# Altium footprint library WE-RJ45 LAN.PcbLib: 101 footprints (part 6 of 7)
Each footprint in its own frame and in the unit in brackets; x right, y up, seen from the top. Pads: shape width x height; smd on the part's side, far side on the other; paste and mask are expansions set on the pad; w line width, h text height; cw(c..) or ccw(c..) is an arc to the next point about the centre after c.
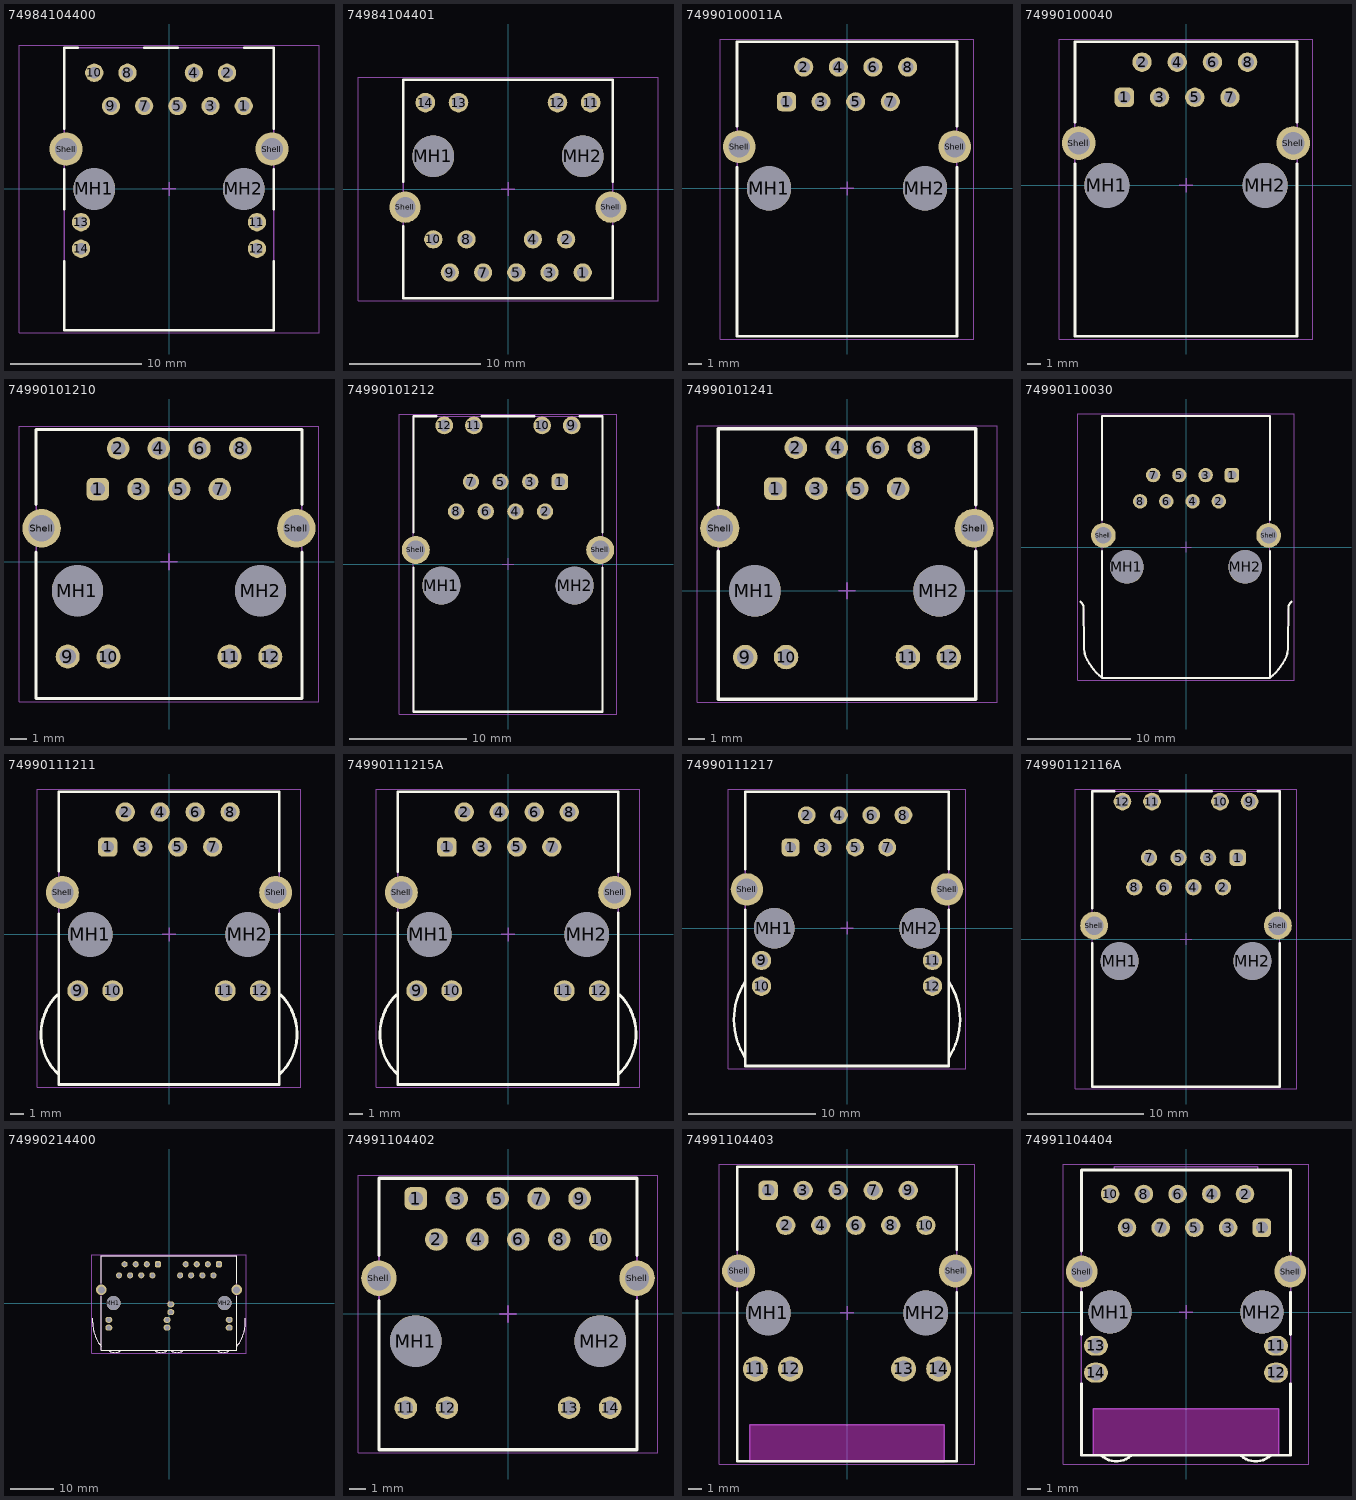
[diagram p5: the footprints below, top view; thin cyan lines are the x and y axes]

## 74984104400 [mm] "10/100Base-T, PoE+, THT, 1x1, Tab up, w/o shield tabs, LED L-R yellow-green/yellow-green, THRw-green/yellow-green, THR"
height 13.85
pads (17):
  round 1.4 hole 0.89: 1(5.72,6.35) 2(4.44,8.89) 3(3.18,6.35) 4(1.9,8.89) 5(0.64,6.35) 7(-1.9,6.35) 8(-3.18,8.89) 9(-4.44,6.35) 10(-5.72,8.89) 11(6.725,-2.54) 12(6.725,-4.57) 13(-6.725,-2.54) 14(-6.725,-4.57)
  round 3.2 hole 3.2 unplated: MH1(-5.715,0) MH2(5.715,0)
  round 2.55 hole 1.7: Shell(-7.875,3.05) Shell(7.875,3.05)
Top Overlay:
  lines w0.2: -8,-5.55 -8,-10.8 8,-10.8 8,-5.55 ; -8,-1.56 -8,1.5 ; -8,4.6 -8,10.8 -7,10.8 ; -1.9,10.8 0.65,10.8 ; 5.75,10.8 8,10.8 8,4.6 ; 8,-1.56 8,1.5
Top Paste:
  region: 11.275,1.75 4.475,1.75 4.475,4.35 11.275,4.35
  region: -4.475,1.75 -11.275,1.75 -11.275,4.35 -4.475,4.35
  region: -2.07,7.79 -4.27,7.79 -4.27,10.59 -2.07,10.59
  region: -4.61,7.79 -6.81,7.79 -6.81,10.59 -4.61,10.59
  region: 3.01,7.79 0.81,7.79 0.81,10.59 3.01,10.59
  region: 5.55,7.79 3.35,7.79 3.35,10.59 5.55,10.59
  region: 6.83,7.45 4.63,7.45 4.63,4.65 6.83,4.65
  region: 4.29,7.45 2.09,7.45 2.09,4.65 4.29,4.65
  region: 1.75,7.45 -0.45,7.45 -0.45,4.65 1.75,4.65
  region: -0.79,7.45 -2.99,7.45 -2.99,4.65 -0.79,4.65
  region: -3.33,7.45 -5.53,7.45 -5.53,4.65 -3.33,4.65
  region: 8.625,-5.37 4.825,-5.37 4.825,-3.77 8.625,-3.77
  region: 8.625,-3.34 4.825,-3.34 4.825,-1.74 8.625,-1.74
  region: -4.825,-5.37 -8.625,-5.37 -8.625,-3.77 -4.825,-3.77
  region: -4.825,-3.34 -8.625,-3.34 -8.625,-1.74 -4.825,-1.74
Assembly Notes:
  text "The stencil layout appplied for / PCB 1.6mm and Stencil 0.15mm" at -5.15,-12.7 h0.5
Top Assembly:
  lines w0.1: -8,-10.8 8,-10.8 8,10.8 -8,10.8 -8,-10.8
Top Designator:
  text ".Designator" at -3.647,-0.357 h1
Top 3D Body:
  lines w0.1: -8,-10.8 8,-10.8 8,10.8 -8,10.8 -8,-10.8
Top Courtyard:
  lines w0.05: -11.475,-11 -11.475,11 11.475,11 11.475,-11 -11.475,-11
Top Component Center:
  lines w0.1: -0.5,0 0.5,0 ; 0,-0.5 0,0.5
3D body "74984104400.stp": height 13.62, standoff -2.9, extent -8.15,-10.8 8.15,10.8

## 74984104401 [mm] "LAN Transformer Through Hole Reflow, body 16.05x16.7mm"
height 16.9
pads (17):
  round 1.4 hole 0.89 paste-2539.97: 1(5.715,-6.39) 2(4.445,-3.85) 3(3.175,-6.39) 4(1.905,-3.85) 5(0.635,-6.39) 7(-1.905,-6.39) 8(-3.175,-3.85) 9(-4.445,-6.39) 10(-5.715,-3.85)
  round 1.5 hole 1 paste-2539.97: 11(6.325,6.61) 12(3.785,6.61) 13(-3.785,6.61) 14(-6.325,6.61)
  round 3.2 hole 3.2 unplated paste-2539.97: MH1(-5.715,2.5) MH2(5.715,2.5)
  round 2.4 hole 1.57 paste-2539.97: Shell(-7.875,-1.39) Shell(7.875,-1.39)
Top Overlay:
  lines w0.2: -8.025,-2.85 -8.025,-8.35 8.025,-8.35 8.025,-2.85 ; -8.025,0.55 -8.025,8.35 8.025,8.35 8.025,0.55
Top Paste:
  region: 4.57,-5.45 8.07,-5.45 8.07,-7.05 4.57,-7.05
  region: -5.59,-5.45 -3.3,-5.45 -3.3,-8.05 -5.59,-8.05
  region: -3.05,-5.45 -0.76,-5.45 -0.76,-8.05 -3.05,-8.05
  region: -0.51,-5.45 1.78,-5.45 1.78,-8.05 -0.51,-8.05
  region: 2.03,-5.45 4.32,-5.45 4.32,-8.05 2.03,-8.05
  region: -4.57,-5.15 -6.86,-5.15 -6.86,-2.55 -4.57,-2.55
  region: -2.03,-5.15 -4.32,-5.15 -4.32,-2.55 -2.03,-2.55
  region: 3.05,-5.15 0.76,-5.15 0.76,-2.55 3.05,-2.55
  region: 5.59,-5.15 3.3,-5.15 3.3,-2.55 5.59,-2.55
  region: -4.475,0.35 -11.275,0.35 -11.275,-2.25 -4.475,-2.25
  region: 4.475,0.35 11.275,0.35 11.275,-2.25 4.475,-2.25
  region: -2.425,5.31 -4.625,5.31 -4.625,7.91 -2.425,7.91
  region: 5.145,5.31 2.945,5.31 2.945,7.91 5.145,7.91
  region: 7.685,5.31 5.485,5.31 5.485,7.91 7.685,7.91
  region: -4.965,5.31 -7.165,5.31 -7.165,7.91 -4.965,7.91
Top Assembly:
  lines w0.1: -8.025,-8.35 8.025,-8.35 8.025,8.35 -8.025,8.35 -8.025,-8.35
Top Designator:
  text ".Designator" at -3.647,-0.357 h1
Top 3D Body:
  lines w0.1: -8.025,-8.35 8.025,-8.35 8.025,8.35 -8.025,8.35 -8.025,-8.35
Top Courtyard:
  lines w0.05: -11.475,-8.55 11.475,-8.55 11.475,8.55 -11.475,8.55 -11.475,-8.55
Top Component Center:
  lines w0.1: -0.5,0 0.5,0 ; 0,-0.5 0,0.5
3D body "74984104401.stp": height 16.95, standoff -2.15, extent -8.225,-8.35 8.223,8.35

## 74990100011A [mm] "LAN Transformer, body 21.84x16.13mm"
height 13.74
pads (12):
  rrect50% 1.4x1.4 hole 0.89: 1(-4.445,6.35)
  round 1.4 hole 0.89: 2(-3.175,8.89) 3(-1.905,6.35) 4(-0.635,8.89) 5(0.635,6.35) 6(1.905,8.89) 7(3.175,6.35) 8(4.445,8.89)
  round 3.25 hole 3.25 unplated: MH1(-5.715,0) MH2(5.715,0)
  round 2.4 hole 1.6: Shell(-7.9,3.05) Shell(7.9,3.05)
Top Overlay:
  lines w0.2: -8.065,1.55 -8.065,-10.85 8.065,-10.85 8.065,1.55 ; -8.065,4.55 -8.065,10.75 8.065,10.75 8.065,4.55
Top Assembly:
  lines w0.1: -8.065,-10.85 8.065,-10.85 8.065,10.75 -8.065,10.75 -8.065,-10.85
Top Designator:
  text ".Designator" at -3.647,-0.357 h1
Top 3D Body:
  lines w0.1: -8.065,-10.85 8.065,-10.85 8.065,10.75 -8.065,10.75 -8.065,-10.85
Top Courtyard:
  lines w0.05: -9.3,-11.05 -9.3,10.95 9.3,10.95 9.3,-11.05 -9.3,-11.05
Top Component Center:
  lines w0.1: -0.5,0 0.5,0 ; 0,-0.5 0,0.5
3D body "74990100011A.stp": height 13.78, standoff -2.94, extent -8.089,-10.85 8.089,10.75

## 74990100040 [mm] "10/100Base-T, THT, 1x1, Tab down, w/o shield tabs, w/o LED, ETR"
height 13.5
pads (12):
  rrect50% 1.4x1.4 hole 0.89: 1(-4.445,6.35)
  round 1.4 hole 0.89: 2(-3.175,8.89) 3(-1.905,6.35) 4(-0.635,8.89) 5(0.635,6.35) 6(1.905,8.89) 7(3.175,6.35) 8(4.445,8.89)
  round 3.25 hole 3.25 unplated: MH1(-5.715,0) MH2(5.715,0)
  round 2.43 hole 1.63: Shell(-7.745,3.05) Shell(7.745,3.05)
Top Overlay:
  lines w0.2: -8.02,1.55 -8.02,-10.89 8.02,-10.89 8.02,1.55 ; -8.02,4.55 -8.02,10.36 8.02,10.36 8.02,4.55
Top Assembly:
  lines w0.1: -8.02,-10.89 8.02,-10.89 8.02,10.36 -8.02,10.36 -8.02,-10.89
Top Designator:
  text ".Designator" at -3.647,-0.357 h1
Top 3D Body:
  lines w0.1: -8.02,-10.89 8.02,-10.89 8.02,10.36 -8.02,10.36 -8.02,-10.89
Top Courtyard:
  lines w0.05: -9.145,-11.09 9.145,-11.09 9.145,10.56 -9.145,10.56 -9.145,-11.09
Top Component Center:
  lines w0.1: -0.5,0 0.5,0 ; 0,-0.5 0,0.5
3D body "74990100040.stp": height 13.55, standoff -3.55, extent -8.15,-10.89 8.15,10.36

## 74990101210 [mm] "LAN Transformer, THT, body 17.1x16.6mm"
height 17.5
pads (16):
  rrect50% 1.4x1.4 hole 0.89: 1(-4.445,4.53)
  round 1.4 hole 0.89: 2(-3.175,7.07) 3(-1.905,4.53) 4(-0.635,7.07) 5(0.635,4.53) 6(1.905,7.07) 7(3.175,4.53) 8(4.445,7.07)
  round 1.5 hole 1.02: 9(-6.325,-5.93) 10(-3.785,-5.93) 11(3.785,-5.93) 12(6.325,-5.93)
  round 3.2 hole 3.2 unplated: MH1(-5.715,-1.82) MH2(5.715,-1.82)
  round 2.4 hole 1.63: Shell(-7.95,2.08) Shell(7.95,2.08)
Top Overlay:
  lines w0.2: -8.3,0.6 -8.3,-8.55 8.3,-8.55 8.3,0.6 ; -8.3,3.56 -8.3,8.25 8.3,8.25 8.3,3.56
Top Assembly:
  lines w0.1: -8.3,-8.55 -8.3,8.25 8.3,8.25 8.3,-8.55 -8.3,-8.55
Top Designator:
  text ".Designator" at -3.647,-0.357 h1
Top 3D Body:
  lines w0.1: -8.3,-8.55 -8.3,8.25 8.3,8.25 8.3,-8.55 -8.3,-8.55
Top Courtyard:
  lines w0.05: -9.365,-8.75 -9.365,8.45 9.365,8.45 9.365,-8.75 -9.365,-8.75
Top Component Center:
  lines w0.1: -0.5,0 0.5,0 ; 0,-0.5 0,0.5
3D body "74990101210.stp": height 17.1, standoff -3.5, extent -8.3,-8.55 8.3,8.35

## 74990101212 [mm] "LAN Transformer, body 25.3x16.2mm"
height 13.5
pads (16):
  rrect50% 1.4x1.4 hole 0.9: 1(4.445,7.04)
  round 1.4 hole 0.9: 2(3.175,4.5) 3(1.905,7.04) 4(0.635,4.5) 5(-0.635,7.04) 6(-1.905,4.5) 7(-3.175,7.04) 8(-4.445,4.5)
  round 1.52 hole 1.02: 9(5.465,11.87) 10(2.925,11.87) 11(-2.925,11.87) 12(-5.465,11.87)
  round 3.25 hole 3.25 unplated: MH1(-5.715,-1.85) MH2(5.715,-1.85)
  round 2.4 hole 1.6: Shell(-7.9,1.2) Shell(7.9,1.2)
Top Overlay:
  lines w0.2: -8.1,-0.3 -8.1,-12.65 8.1,-12.65 8.1,-0.3 ; -8.1,2.7 -8.1,12.65 -6.15,12.65 ; -2.25,12.65 2.24,12.65 ; 6.15,12.65 8.1,12.65 8.1,2.7
Top Assembly:
  lines w0.1: -8.1,-12.65 8.1,-12.65 8.1,12.65 -8.1,12.65 -8.1,-12.65
Top Designator:
  text ".Designator" at -3.647,-0.357 h1
Top 3D Body:
  lines w0.1: -8.1,-12.65 8.1,-12.65 8.1,12.65 -8.1,12.65 -8.1,-12.65
Top Courtyard:
  lines w0.05: -9.3,-12.85 9.3,-12.85 9.3,12.85 -9.3,12.85 -9.3,-12.85
Top Component Center:
  lines w0.1: -0.5,0 0.5,0 ; 0,-0.5 0,0.5
3D body "74990101212.stp": height 13.61, standoff -3.79, extent -8.2,-12.65 8.2,12.65

## 74990101241 [mm] "LAN Transformer, body 17.5x16.8mm"
height 17.5
pads (16):
  rrect50% 1.4x1.4 hole 0.89: 1(-4.445,6.35)
  round 1.4 hole 0.89: 2(-3.175,8.89) 3(-1.905,6.35) 4(-0.635,8.89) 5(0.635,6.35) 6(1.905,8.89) 7(3.175,6.35) 8(4.445,8.89)
  round 1.52 hole 1.02: 9(-6.325,-4.11) 10(-3.785,-4.11) 11(3.785,-4.11) 12(6.325,-4.11)
  round 3.2 hole 3.2 unplated: MH1(-5.715,0) MH2(5.715,0)
  round 2.43 hole 1.63: Shell(-7.9,3.89) Shell(7.9,3.89)
Top Overlay:
  lines w0.2: -8,2.47 -8,-6.73 8,-6.73 8,2.47 ; -8,5.33 -8,10.07 8,10.07 8,5.33
Top Assembly:
  lines w0.1: -8,-6.73 8,-6.73 8,10.07 -8,10.07 -8,-6.73
Top Designator:
  text ".Designator" at -3.647,-0.357 h1
Top 3D Body:
  lines w0.1: -8,-6.73 8,-6.73 8,10.07 -8,10.07 -8,-6.73
Top Courtyard:
  lines w0.05: -9.315,-6.93 -9.315,10.27 9.315,10.27 9.315,-6.93 -9.315,-6.93
Top Component Center:
  lines w0.1: -0.5,0 0.5,0 ; 0,-0.5 0,0.5
3D body "74990101241.stp": height 16.94, standoff -3.46, extent -8.17,-6.78 8.17,10.07

## 74990110030 [mm] "LAN Transformer, body 25.35x16.25mm"
height 13.5
pads (12):
  rrect50% 1.4x1.4 hole 0.9: 1(4.445,6.965)
  round 1.4 hole 0.9: 2(3.175,4.425) 3(1.905,6.965) 4(0.635,4.425) 5(-0.635,6.965) 6(-1.905,4.425) 7(-3.175,6.965) 8(-4.445,4.425)
  round 3.25 hole 3.25 unplated: MH1(-5.715,-1.925) MH2(5.715,-1.925)
  round 2.4 hole 1.6: Shell(-8,1.125) Shell(8,1.125)
Top Overlay:
  lines w0.2: -10.21,-5.293 cw(c-10.631,-5.879) -9.917,-5.98 -9.879,-9.38 ccw(c-3,-9.28) -9.853,-9.88 ccw(c-7.8,-9.88) -9.728,-10.585 ccw(c-4.3,-8.08) -8.125,-12.675 ; -8.125,-0.375 -8.125,-12.675 ; -8.125,2.625 -8.125,12.675 8.125,12.675 8.125,2.625 ; 8.125,-0.375 8.125,-12.675 ; 10.21,-5.293 ccw(c10.631,-5.879) 9.917,-5.98 9.879,-9.38 cw(c3,-9.28) 9.853,-9.88 cw(c7.8,-9.88) 9.728,-10.585 cw(c4.3,-8.08) 8.125,-12.675 ; -8.125,-12.675 8.125,-12.675
Top Assembly:
  lines w0.1: -10.21,-5.293 cw(c-10.631,-5.879) -9.917,-5.98 -9.879,-9.38 ccw(c-3,-9.28) -9.853,-9.88 ccw(c-7.8,-9.88) -9.728,-10.585 ccw(c-4.3,-8.08) -8.125,-12.675 ; 10.21,-5.293 ccw(c10.631,-5.879) 9.917,-5.98 9.879,-9.38 cw(c3,-9.28) 9.853,-9.88 cw(c7.8,-9.88) 9.728,-10.585 cw(c4.3,-8.08) 8.125,-12.675 ; -8.125,-12.675 -8.125,12.675 8.125,12.675 8.125,-12.675 ; -8.125,-12.675 8.125,-12.675
Top Designator:
  text ".Designator" at -3.647,-0.357 h1
Top 3D Body:
  lines w0.1: -10.21,-5.293 cw(c-10.631,-5.879) -9.917,-5.98 -9.879,-9.38 ccw(c-3,-9.28) -9.853,-9.88 ccw(c-7.8,-9.88) -9.728,-10.585 ccw(c-4.3,-8.08) -8.125,-12.675 ; 10.21,-5.293 ccw(c10.631,-5.879) 9.917,-5.98 9.879,-9.38 cw(c3,-9.28) 9.853,-9.88 cw(c7.8,-9.88) 9.728,-10.585 cw(c4.3,-8.08) 8.125,-12.675 ; -8.125,-12.675 -8.125,12.675 8.125,12.675 8.125,-12.675 ; -8.125,-12.675 8.125,-12.675
Top Courtyard:
  lines w0.05: -10.5,-12.875 10.5,-12.875 10.5,12.875 -10.5,12.875 -10.5,-12.875
Top Component Center:
  lines w0.1: -0.5,0 0.5,0 ; 0,-0.5 0,0.5
3D body "74990110030.stp": height 15.78, standoff -3.33, extent -10.298,-12.675 10.298,12.675

## 74990111211 [mm] "Integrated RJ45 Transformer, THT, body 16.00 x 21.25 mm"
height 13.5
pads (16):
  rrect50% 1.4x1.4 hole 0.9: 1(-4.45,6.35)
  round 1.4 hole 0.9: 2(-3.18,8.89) 3(-1.91,6.35) 4(-0.64,8.89) 5(0.63,6.35) 6(1.9,8.89) 7(3.17,6.35) 8(4.44,8.89)
  round 1.52 hole 1.03: 9(-6.625,-4.08) 10(-4.085,-4.08) 11(4.085,-4.08) 12(6.625,-4.08)
  round 3.25 hole 3.25 unplated: MH1(-5.715,0) MH2(5.715,0)
  round 2.4 hole 1.6: Shell(-7.745,3.05) Shell(7.745,3.05)
Top Overlay:
  lines w0.2: -8.099,-4.377 ccw(c-5.31,-7.23) -8.001,-10.176 ; -8,1.5 -8,-10.89 8,-10.89 8,1.5 ; -8,4.6 -8,10.36 8,10.36 8,4.6 ; 8.001,-10.176 ccw(c5.31,-7.23) 8.099,-4.377
Top Assembly:
  lines w0.1: -8.099,-4.377 ccw(c-5.31,-7.23) -8.001,-10.176 ; 8.001,-10.176 ccw(c5.31,-7.23) 8.099,-4.377 ; -8,-10.89 -8,10.36 8,10.36 8,-10.89 -8,-10.89
Top Designator:
  text ".Designator" at -3.647,-0.357 h1
Top 3D Body:
  lines w0.1: -8.099,-4.377 ccw(c-5.31,-7.23) -8.001,-10.176 ; 8.001,-10.176 ccw(c5.31,-7.23) 8.099,-4.377 ; -8,-10.89 -8,10.36 8,10.36 8,-10.89 -8,-10.89
Top Courtyard:
  lines w0.05: -9.548,-11.09 9.548,-11.09 9.548,10.56 -9.548,10.56 -9.548,-11.09
Top Component Center:
  lines w0.1: -0.5,0 0.5,0 ; 0,-0.5 0,0.5
3D body "74990111211.stp": height 14.95, standoff -3.5, extent -9.348,-10.89 9.348,10.36

## 74990111215A [mm] "RJ45 LAN Transformer, THT, body 16.00 x 21.25 mm"
height 13.5
pads (16):
  rrect50% 1.4x1.4 hole 0.9: 1(-4.445,6.35)
  round 1.4 hole 0.9: 2(-3.175,8.89) 3(-1.905,6.35) 4(-0.635,8.89) 5(0.635,6.35) 6(1.905,8.89) 7(3.175,6.35) 8(4.445,8.89)
  round 1.52 hole 1.02: 9(-6.625,-4.08) 10(-4.085,-4.08) 11(4.085,-4.08) 12(6.625,-4.08)
  round 3.25 hole 3.25 unplated: MH1(-5.715,0) MH2(5.715,0)
  round 2.4 hole 1.6: Shell(-7.745,3.05) Shell(7.745,3.05)
Top Overlay:
  lines w0.2: -8.099,-4.377 ccw(c-5.31,-7.23) -8.001,-10.176 ; -8,1.55 -8,-10.89 8,-10.89 8,1.55 ; -8,4.55 -8,10.36 8,10.36 8,4.55 ; 8.001,-10.176 ccw(c5.31,-7.23) 8.099,-4.377
Top Assembly:
  lines w0.1: -8.099,-4.377 ccw(c-5.31,-7.23) -8.001,-10.176 ; 8.001,-10.176 ccw(c5.31,-7.23) 8.099,-4.377 ; -8,-10.89 8,-10.89 8,10.36 -8,10.36 -8,-10.89
Top Designator:
  text ".Designator" at -3.647,-0.357 h1
Top 3D Body:
  lines w0.1: -8.099,-4.377 ccw(c-5.31,-7.23) -8.001,-10.176 ; 8.001,-10.176 ccw(c5.31,-7.23) 8.099,-4.377 ; -8,-10.89 8,-10.89 8,10.36 -8,10.36 -8,-10.89
Top Courtyard:
  lines w0.05: -9.548,-11.09 9.548,-11.09 9.548,10.56 -9.548,10.56 -9.548,-11.09
Top Component Center:
  lines w0.1: -0.5,0 0.5,0 ; 0,-0.5 0,0.5
3D body "74990111215A.stp": height 14.95, standoff -3.5, extent -9.348,-10.89 9.348,10.36

## 74990111217 [mm] "LAN Transformer, body 21.3x16mm"
height 15.01
pads (16):
  rrect50% 1.4x1.4 hole 0.89: 1(-4.445,6.35)
  round 1.4 hole 0.89: 2(-3.175,8.89) 3(-1.905,6.35) 4(-0.635,8.89) 5(0.635,6.35) 6(1.905,8.89) 7(3.175,6.35) 8(4.445,8.89)
  round 1.52 hole 1.02: 9(-6.725,-2.54) 10(-6.725,-4.57) 11(6.725,-2.54) 12(6.725,-4.57)
  round 3.2 hole 3.2 unplated: MH1(-5.715,0) MH2(5.715,0)
  round 2.55 hole 1.7: Shell(-7.875,3.05) Shell(7.875,3.05)
Top Overlay:
  lines w0.2: -8.025,-4.229 ccw(c-3.435,-7.196) -8,-10.2 ; -8,1.45 -8,-10.85 8,-10.85 8,1.45 ; -8,4.65 -8,10.75 8,10.75 8,4.65 ; 8,-10.2 ccw(c3.435,-7.196) 8.025,-4.229
Top Assembly:
  lines w0.1: -8.025,-4.229 ccw(c-3.435,-7.196) -8,-10.2 ; 8,-10.2 ccw(c3.435,-7.196) 8.025,-4.229 ; -8,-10.85 -8,10.75 8,10.75 8,-10.85 -8,-10.85
Top Designator:
  text ".Designator" at -3.647,-0.357 h1
Top 3D Body:
  lines w0.1: -8.025,-4.229 ccw(c-3.435,-7.196) -8,-10.2 ; 8,-10.2 ccw(c3.435,-7.196) 8.025,-4.229 ; -8,-10.85 -8,10.75 8,10.75 8,-10.85 -8,-10.85
Top Courtyard:
  lines w0.05: -9.35,-11.05 -9.35,10.95 9.35,10.95 9.35,-11.05 -9.35,-11.05
Top Component Center:
  lines w0.1: -0.5,0 0.5,0 ; 0,-0.5 0,0.5
3D body "74990111217.stp": height 14.81, standoff -3.09, extent -8.95,-10.85 8.95,10.75

## 74990112116A [mm] "LAN Transformer, body 25.3x16.2mm"
height 13.5
pads (16):
  rrect50% 1.4x1.4 hole 0.9: 1(4.445,6.99)
  round 1.4 hole 0.9: 2(3.175,4.45) 3(1.905,6.99) 4(0.635,4.45) 5(-0.635,6.99) 6(-1.905,4.45) 7(-3.175,6.99) 8(-4.445,4.45)
  round 1.52 hole 1.02: 9(5.465,11.82) 10(2.925,11.82) 11(-2.925,11.82) 12(-5.465,11.82)
  round 3.25 hole 3.25 unplated: MH1(-5.715,-1.9) MH2(5.715,-1.9)
  round 2.4 hole 1.6: Shell(-7.9,1.15) Shell(7.9,1.15)
Top Overlay:
  lines w0.2: -8.05,-0.35 -8.05,-12.7 8.05,-12.7 8.05,-0.35 ; -8.05,2.65 -8.05,12.6 ; -8.05,12.7 -6.15,12.7 ; -2.25,12.7 2.24,12.7 ; 6.15,12.7 8.05,12.7 ; 8.05,2.65 8.05,12.6
Top Assembly:
  lines w0.1: -8.05,-12.7 -8.05,12.7 8.05,12.7 8.05,-12.7 -8.05,-12.7
Top Designator:
  text ".Designator" at -3.647,-0.357 h1
Top 3D Body:
  lines w0.1: -8.05,-12.7 -8.05,12.7 8.05,12.7 8.05,-12.7 -8.05,-12.7
Top Courtyard:
  lines w0.05: -9.543,-12.9 9.543,-12.9 9.543,12.9 -9.543,12.9 -9.543,-12.9
Top Component Center:
  lines w0.1: -0.5,0 0.5,0 ; 0,-0.5 0,0.5
3D body "74990112116A.stp": height 14.85, standoff -3.24, extent -9.343,-12.7 9.343,12.7

## 74990214400 [mm] "10/100Base-T, THT, 1x2, Tab up, with shielding, with LED L-R green/yellow - green/yellow, ETR"
height 13.4
pads (28):
  rrect50% 1.4x1.4 hole 0.9: A1(-2.54,8.89) B1(11.43,8.89)
  round 1.4 hole 0.9: A2(-3.81,6.35) A3(-5.08,8.89) A4(-6.35,6.35) A5(-7.62,8.89) A6(-8.89,6.35) A7(-10.16,8.89) A8(-11.43,6.35) B2(10.16,6.35) B3(8.89,8.89) B4(7.62,6.35) B5(6.35,8.89) B6(5.08,6.35) B7(3.81,8.89) B8(2.54,6.35)
  oval 1.6x1.4 hole 1.02: A9(-13.77,-3.84) A10(-13.77,-5.62) A11(-0.43,-3.84) A12(-0.43,-5.62) B9(0.42,-0.28) B10(0.42,-2.06) B11(13.77,-3.84) B12(13.77,-5.62)
  round 3.25 hole 3.25 unplated: MH1(-12.7,0) MH2(12.7,0)
  round 2.4 hole 1.6: Shell(-15.5,3.05) Shell(15.5,3.05)
Top Overlay:
  lines w0.2: -17.457,-3.5 -17.457,-4.451 ccw(c8.395,-2.491) -17.201,-6.614 ccw(c-8.35,-4.15) -15.529,-9.883 ; -15.5,1.55 -15.5,-10.8 15.5,-10.8 15.5,1.55 ; -15.5,4.55 -15.5,10.88 15.5,10.88 15.5,4.55 ; -13.88,-10.8 ccw(c-12.38,-8.8) -10.88,-10.8 ; -3.34,-10.8 ccw(c-1.84,-8.8) -0.34,-10.8 ; 0.34,-10.8 ccw(c1.84,-8.8) 3.34,-10.8 ; 10.88,-10.8 ccw(c12.38,-8.8) 13.88,-10.8 ; 15.529,-9.883 ccw(c8.35,-4.15) 17.201,-6.614 ccw(c-8.395,-2.491) 17.457,-4.451 17.457,-3.5
Top Assembly:
  lines w0.1: -17.457,-3.5 -17.457,-4.451 ccw(c8.395,-2.491) -17.201,-6.614 ccw(c-8.35,-4.15) -15.529,-9.883 ; -13.88,-10.8 ccw(c-12.38,-8.8) -10.88,-10.8 ; -3.34,-10.8 ccw(c-1.84,-8.8) -0.34,-10.8 ; 0.34,-10.8 ccw(c1.84,-8.8) 3.34,-10.8 ; 10.88,-10.8 ccw(c12.38,-8.8) 13.88,-10.8 ; 15.529,-9.883 ccw(c8.35,-4.15) 17.201,-6.614 ccw(c-8.395,-2.491) 17.457,-4.451 17.457,-3.5 ; -15.5,-10.8 15.5,-10.8 15.5,10.88 -15.5,10.88 -15.5,-10.8
Top Designator:
  text ".Designator" at -3.647,-0.357 h1
Top 3D Body:
  lines w0.1: -17.457,-3.5 -17.457,-4.451 ccw(c8.395,-2.491) -17.201,-6.614 ccw(c-8.35,-4.15) -15.529,-9.883 ; -13.88,-10.8 ccw(c-12.38,-8.8) -10.88,-10.8 ; -3.34,-10.8 ccw(c-1.84,-8.8) -0.34,-10.8 ; 0.34,-10.8 ccw(c1.84,-8.8) 3.34,-10.8 ; 10.88,-10.8 ccw(c12.38,-8.8) 13.88,-10.8 ; 15.529,-9.883 ccw(c8.35,-4.15) 17.201,-6.614 ccw(c-8.395,-2.491) 17.457,-4.451 17.457,-3.5 ; -15.5,-10.8 15.5,-10.8 15.5,10.88 -15.5,10.88 -15.5,-10.8
Top Courtyard:
  lines w0.05: -17.657,-11.5 -17.657,11.08 17.657,11.08 17.657,-11.5 -17.657,-11.5
Top Component Center:
  lines w0.1: -0.5,0 0.5,0 ; 0,-0.5 0,0.5
3D body "74990214400.stp": height 15.6, standoff -3.45, extent -17.5,-11.32 17.5,10.88

## 74991104402 [mm] "10/100/1000Base-T, THT, 1x1, Tab   vertical, w/o shield tabs, with LED L-R yellow-green/yellow-green, ETR"
height 16.9
pads (18):
  rrect50% 1.4x1.4 hole 0.9: 1(-5.72,7.16)
  round 1.4 hole 0.9: 2(-4.44,4.62) 3(-3.18,7.16) 4(-1.9,4.62) 5(-0.64,7.16) 6(0.64,4.62) 7(1.9,7.16) 8(3.18,4.62) 9(4.44,7.16) 10(5.72,4.62) 11(-6.33,-5.81) 12(-3.785,-5.81) 13(3.785,-5.81) 14(6.33,-5.81)
  round 3.2 hole 3.2 unplated: MH1(-5.72,-1.68) MH2(5.72,-1.68)
  round 2.2 hole 1.5: Shell(-8,2.22) Shell(8,2.22)
Top Overlay:
  lines w0.2: -8,0.82 -8,-8.41 8,-8.41 8,0.82 ; -8,3.62 -8,8.41 8,8.41 8,3.62
Top Assembly:
  lines w0.1: -8,-8.41 -8,8.41 8,8.41 8,-8.41 -8,-8.41
Top Designator:
  text ".Designator" at -3.647,-0.357 h1
Top 3D Body:
  lines w0.1: -8,-8.41 -8,8.41 8,8.41 8,-8.41 -8,-8.41
Top Courtyard:
  lines w0.05: -9.3,-8.61 -9.3,8.61 9.3,8.61 9.3,-8.61 -9.3,-8.61
Top Component Center:
  lines w0.1: -0.5,0 0.5,0 ; 0,-0.5 0,0.5
3D body "74991104402.stp": height 16.95, standoff -3.45, extent -8.2,-8.41 8.2,8.41

## 74991104403 [mm] "Integrated RJ45 Transformer"
height 13.63
pads (18):
  rrect50% 1.4x1.4 hole 0.9: 1(-5.715,8.89)
  round 1.4 hole 0.9: 2(-4.445,6.35) 3(-3.175,8.89) 4(-1.905,6.35) 5(-0.635,8.89) 6(0.635,6.35) 7(1.905,8.89) 8(3.175,6.35) 9(4.445,8.89) 10(5.715,6.35)
  round 1.8 hole 1.2: 11(-6.64,-4.06) 12(-4.1,-4.06) 13(4.1,-4.06) 14(6.64,-4.06)
  round 3.25 hole 3.25 unplated: MH1(-5.715,0) MH2(5.715,0)
  round 2.4 hole 1.6: Shell(-7.855,3.05) Shell(7.855,3.05)
Top Layer keep-out:
  region: -7.05,-10.8 7.05,-10.8 7.05,-8.1 -7.05,-8.1
Top Overlay:
  lines w0.2: -7.95,1.5 -7.95,-10.75 7.95,-10.75 7.95,1.5 ; -7.95,4.6 -7.95,10.6 7.95,10.6 7.95,4.6
Assembly Notes:
  lines w0.1: -7.05,-10.8 -7.05,-8.1 7.05,-8.1 7.05,-10.8 -7.05,-10.8 ; -7.05,-10.8 -7.05,-10.8
  text "Keep-out area" at -3.774,-9.847 h1.5
Top Assembly:
  lines w0.1: -7.95,-10.75 7.95,-10.75 7.95,10.6 -7.95,10.6 -7.95,-10.75
Top Designator:
  text ".Designator" at -3.647,-0.357 h1
Top 3D Body:
  lines w0.1: -7.95,-10.75 7.95,-10.75 7.95,10.6 -7.95,10.6 -7.95,-10.75
Top Courtyard:
  lines w0.05: -9.255,-10.95 9.255,-10.95 9.255,10.8 -9.255,10.8 -9.255,-10.95
Top Component Center:
  lines w0.1: -0.5,0 0.5,0 ; 0,-0.5 0,0.5
3D body "74991104403.stp": height 13.76, standoff -3.37, extent -8.17,-10.75 8.17,10.6

## 74991104404 [mm]
height 13.4
pads (18):
  rrect50% 1.4x1.4 hole 0.9: 1(5.715,6.35)
  round 1.4 hole 0.9: 2(4.445,8.89) 3(3.175,6.35) 4(1.905,8.89) 5(0.635,6.35) 6(-0.635,8.89) 7(-1.905,6.35) 8(-3.175,8.89) 9(-4.445,6.35) 10(-5.715,8.89)
  oval 1.8x1.5 hole 1.2: 11(6.785,-2.54) 12(6.785,-4.57) 13(-6.785,-2.54) 14(-6.785,-4.57)
  round 3.25 hole 3.25 unplated: MH1(-5.715,0) MH2(5.715,0)
  round 2.4 hole 1.6: Shell(-7.85,3.05) Shell(7.85,3.05)
Top Layer keep-out:
  region: -7.005,-10.8 7.005,-10.8 7.005,-7.3 -7.005,-7.3
Top Overlay:
  lines w0.2: -7.875,-5.4 -7.875,-10.8 7.875,-10.8 7.875,-5.4 ; -7.875,-1.7 -7.875,1.5 ; -7.875,4.6 -7.875,10.7 7.875,10.7 7.875,4.6 ; -6.379,-10.808 ccw(c-5.255,-9.6) -4.14,-10.816 ; 4.14,-10.816 ccw(c5.255,-9.6) 6.379,-10.808 ; 7.875,-1.7 7.875,1.5
Assembly Notes:
  lines w0.1: -7.005,-10.8 -7.005,-7.3 7.005,-7.3 7.005,-10.8 -7.005,-10.8 ; -7.005,-10.8 -7.005,-10.8
  text "Keep-out area" at -4.174,-9.347 h1.5
Top Assembly:
  lines w0.1: -6.379,-10.808 ccw(c-5.255,-9.6) -4.14,-10.816 ; -5.4,10.7 -5.4,10.95 5.4,10.95 5.4,10.7 ; 4.14,-10.816 ccw(c5.255,-9.6) 6.379,-10.808 ; -7.875,-10.8 7.875,-10.8 7.875,10.7 -7.875,10.7 -7.875,-10.8
Top Designator:
  text ".Designator" at -3.647,-0.357 h1
Top 3D Body:
  lines w0.1: -6.379,-10.808 ccw(c-5.255,-9.6) -4.14,-10.816 ; -5.4,10.7 -5.4,10.95 5.4,10.95 5.4,10.7 ; 4.14,-10.816 ccw(c5.255,-9.6) 6.379,-10.808 ; -7.875,-10.8 7.875,-10.8 7.875,10.7 -7.875,10.7 -7.875,-10.8
Top Courtyard:
  lines w0.05: -9.25,-11.45 9.25,-11.45 9.25,11.15 -9.25,11.15 -9.25,-11.45
Top Component Center:
  lines w0.1: -0.5,0 0.5,0 ; 0,-0.5 0,0.5
3D body "74991104404.stp": height 13.9, standoff -3.3, extent -8.125,-11.25 8.125,10.95